# Altium schematic symbol library VJ0805Y104KCAAJ.SchLib: 1 symbol
Pins are listed as number, name and electrical type; pins without a type are passive.

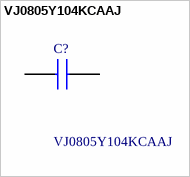
[diagram p0: symbol VJ0805Y104KCAAJ]

## VJ0805Y104KCAAJ
designator C?
100nF, X7R, Multilayer Ceramic Capacitors MLCC - SMD/SMT VJ0805 X7R 104 0.1 non-magnetic copper barrier 50V unmarked 7" reel tape; Manufacturer_Name: Vishay; Geometry.Height: 1.45mm; Mouser Part Number: *; Mouser Price/Stock: *; Manufacturer_Part_Number: VJ0805Y104KCAAJ; Datasheet Link: http://www.vishay.com/docs/45226/vj31xrohsautomlcc.pdf
footprint CAPC2012X145N
pins: 1, 2